# Altium footprint library PcbLib.PcbLib: 162 footprints (part 6 of 11)
Each footprint in its own frame and in the unit in brackets; x right, y up, seen from the top. Pads: shape width x height; smd on the part's side, far side on the other; paste and mask are expansions set on the pad; w line width, h text height; cw(c..) or ccw(c..) is an arc to the next point about the centre after c.
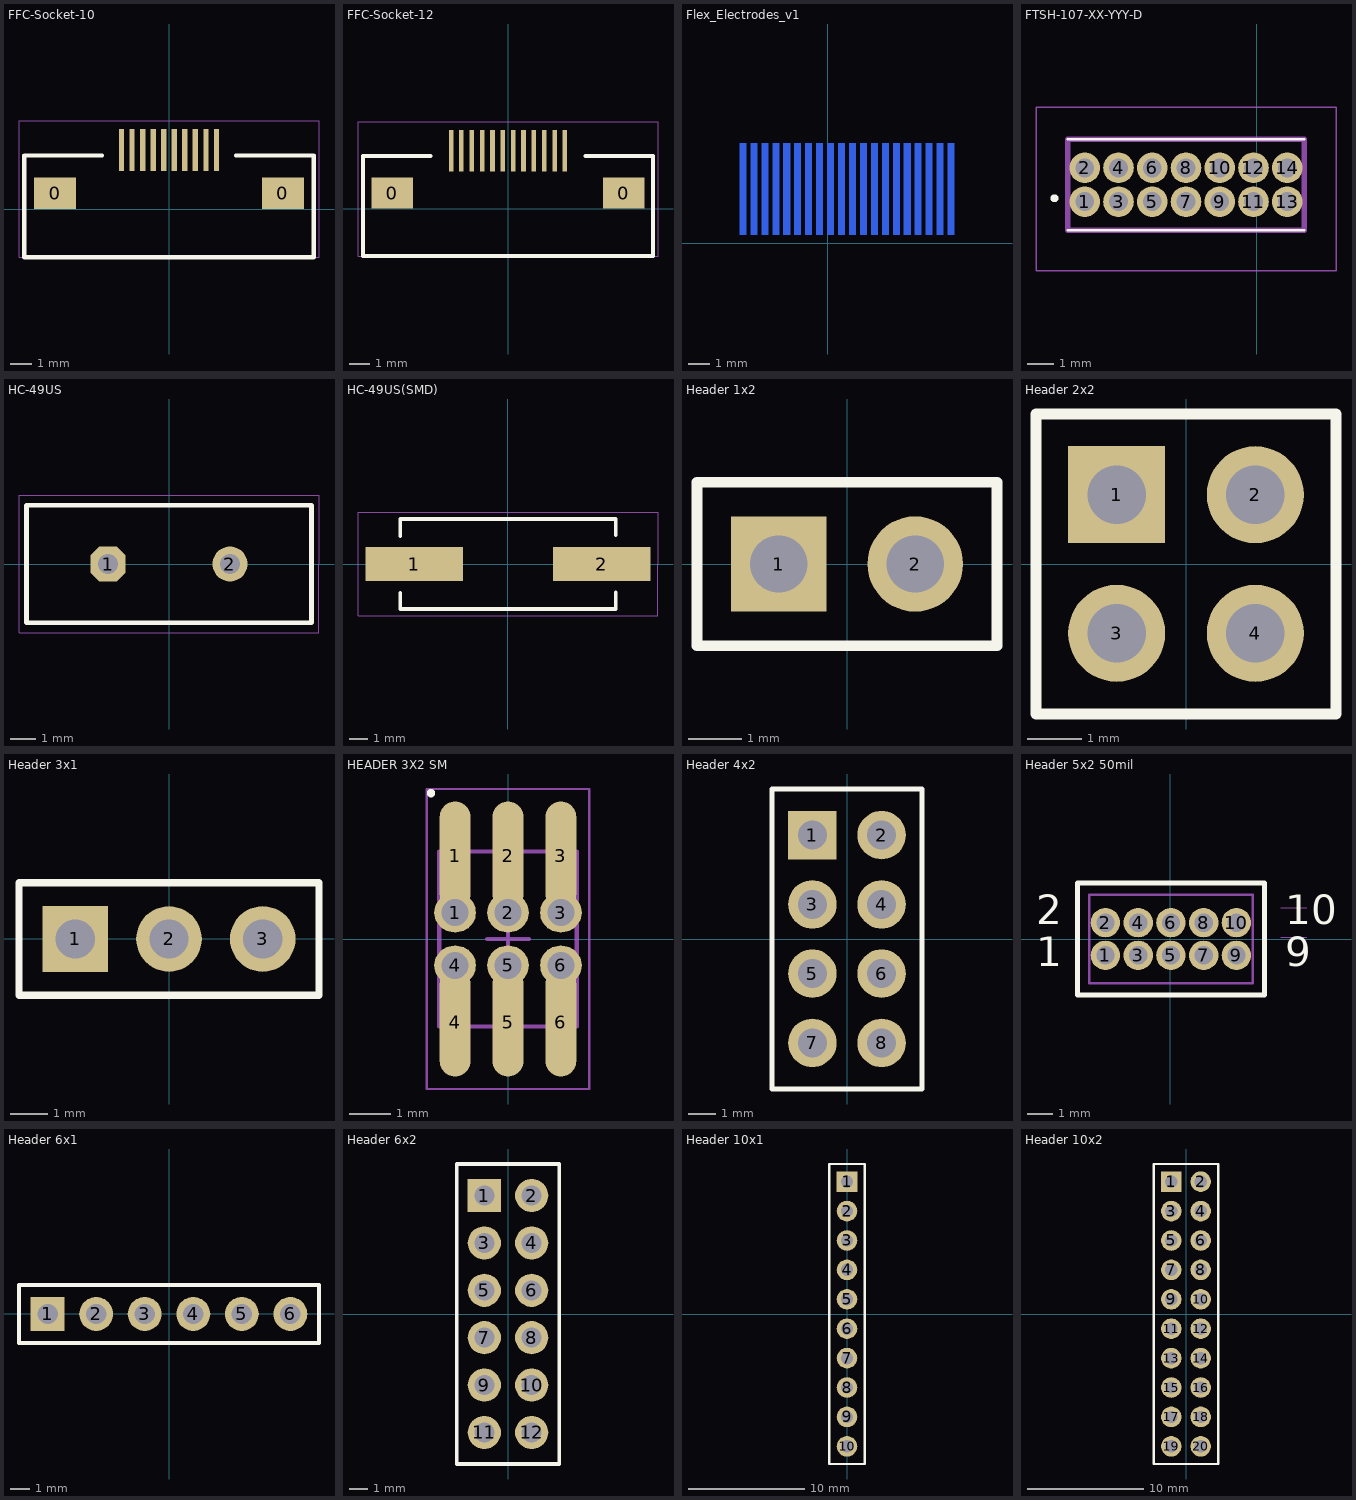
[diagram p5: the footprints below, top view; thin cyan lines are the x and y axes]

## FFC-Socket-10 [mm] "SMD FFC Cable ZIF Socket 10 Pin"
height 2
pads (12):
  rect 2x1.5 smd: 0(-5.4,0.75) 0(5.4,0.75)
  rect 0.25x2 smd: 1(-2.25,2.8) 2(-1.75,2.8) 3(-1.25,2.8) 4(-0.75,2.8) 5(-0.25,2.8) 6(0.25,2.8) 7(0.75,2.8) 8(1.25,2.8) 9(1.75,2.8) 10(2.25,2.8)
Top Overlay:
  lines w0.2: -3.175,2.54 -6.858,2.54 -6.858,-2.286 6.858,-2.286 6.858,2.54 3.175,2.54
Mechanical 15:
  lines w0.05: -7.112,-2.286 7.112,-2.286 7.112,4.191 -7.112,4.191 -7.112,-2.286
3D body "71117.stp": height 2, standoff 0.13, extent -5.25,-2.36 5.25,2.54

## FFC-Socket-12 [mm] "SMD FFC Cable ZIF Socket 12 Pin"
height 2
pads (14):
  rect 2x1.5 smd: 0(-5.6,0.75) 0(5.6,0.75)
  rect 0.22x2 smd: 1(-2.75,2.8) 2(-2.25,2.8) 3(-1.75,2.8) 5(-0.75,2.8) 6(-0.25,2.8) 7(0.25,2.8) 8(0.75,2.8) 9(1.25,2.8) 10(1.75,2.8) 11(2.25,2.8) 12(2.75,2.8)
  rect 0.23x2 smd: 4(-1.25,2.8)
Top Overlay:
  lines w0.2: -3.75,2.54 -7,2.54 -7,-2.286 7,-2.286 7,2.54 3.75,2.54
Mechanical 15:
  lines w0.05: -7.25,-2.286 -7.25,4.191 7.25,4.191 7.25,-2.286 -7.25,-2.286
3D body "ssfv12r_2stlf.stp": height 1.87, standoff 0, extent -5.75,-2.35 5.75,2.55

## Flex_Electrodes_v1 [mm]
pads (20):
  rect 0.3x4.216 smd far side: 1(-3.886,2.494) 2(-3.383,2.494) 3(-2.879,2.494) 4(-2.376,2.494) 5(-1.873,2.494) 6(-1.37,2.494) 7(-0.867,2.494) 8(-0.363,2.494) 9(0.14,2.494) 10(0.643,2.494) 11(1.146,2.494) 12(1.649,2.494) 13(2.153,2.494) 14(2.656,2.494) 15(3.159,2.494) 16(3.662,2.494) 17(4.165,2.494) 18(4.669,2.494) 19(5.172,2.494) 20(5.675,2.494)

## FTSH-107-XX-YYY-D [mm]
pads (14):
  round 1.15 hole 0.71: 1(-6.477,-10.922) 2(-6.477,-9.652) 3(-5.207,-10.922) 4(-5.207,-9.652) 5(-3.937,-10.922) 6(-3.937,-9.652) 7(-2.667,-10.922) 8(-2.667,-9.652) 9(-1.397,-10.922) 10(-1.397,-9.652) 11(-0.127,-10.922) 12(-0.127,-9.652) 13(1.143,-10.922) 14(1.143,-9.652)
Top Overlay:
  circle w0.2: c-7.62,-10.795 r0.05
  lines w0.1: -7.112,-12.002 1.778,-12.002 ; -7.112,-8.572 1.778,-8.572
Mechanical 13:
  lines w0.2: -7.112,-12.002 -7.112,-8.572 1.778,-8.572 1.778,-12.002 -7.112,-12.002
Mechanical 15:
  lines w0.05: -8.312,-13.522 -8.312,-7.372 2.978,-7.372 2.978,-13.522 -8.312,-13.522
3D body "FTSH-107-04-L-D.stp": height 6.34, standoff -2.27, extent -7.112,-11.938 1.778,-8.509

## HC-49US [mm] "Quartz Crystal"
height 4
pads (2):
  oct 1.4x1.4 / inner oct 2x2 / far side oct 2x2 hole 0.8: 1(-2.44,0)
  round 1.4 / inner round 2 / far side round 2 hole 0.8: 2(2.44,0)
Top Overlay:
  lines w0.2: -5.7,-2.35 -5.7,2.35 5.7,2.35 5.7,-2.35 -5.7,-2.35
Mechanical 15:
  lines w0.05: -5.999,-2.749 5.999,-2.749 6,2.75 -6,2.749 -5.999,-2.75
3D body "SW3dPS-hc49us-1.STEP": height 3.5, standoff -3, extent -5.7,-2.325 5.8,2.325

## HC-49US(SMD) [mm] "SMD LOW PROFILE CRYSTAL"
height 4.2
pads (2):
  rect 5.2x1.8 smd: 1(-5,0) 2(5,0)
Top Overlay:
  lines w0.2: -5.75,-1.55 -5.75,-2.4 5.75,-2.4 5.75,-1.5 ; -5.75,1.5 -5.75,2.4 5.75,2.4 5.75,1.55
Mechanical 15:
  lines w0.05: -8,-2.749 8,-2.749 8,2.75 -8,2.749 -8,-2.749
3D body "User Library-HC49US.STEP": height 4.2, standoff 0, extent -6.4,-2.35 6.3,2.35

## Header 1x2 [mil] "2-Pin, 1 Row, 2 Column Header"
height 488.19
pads (2):
  rect 70x70 hole 42: 1(-50,0)
  round 70 hole 42: 2(50,0)
Top Overlay:
  lines w7.87: -110,-60 -110,60 110,60 110,-60 -110,-60

## Header 2x2 [mil] "4-Pin, 2 Row, 2 Column Header"
height 488.19
pads (4):
  rect 70x70 hole 42: 1(-50,50)
  round 70 hole 42: 2(50,50) 3(-50,-50) 4(50,-50)
Top Overlay:
  lines w7.87: -108.27,-108.27 108.27,-108.27 108.27,108.27 -108.27,108.27 -108.27,-108.27

## Header 3x1 [mil] "3-Pin, 1 Row, Header"
height 472.44
pads (3):
  rect 70x70 hole 42: 1(-100,0)
  round 70 hole 42: 2(0,0) 3(100,0)
Top Overlay:
  lines w7.87: -160,-60.08 -160,60 160,60 160,-60.08 -160,-60.08
3D body "pin_header_aw_108_03-t.stp": height 370.08, standoff -118.11, extent -155,-50 145,48.28

## HEADER 3X2 SM [mm] "Surface Mount 3x2 Pin Header"
height 5
pads (12):
  oval 1x0.95 hole 0.65: 1(-1.27,0.635) 2(0,0.635) 3(1.27,0.635) 4(-1.27,-0.635) 5(0,-0.635) 6(1.27,-0.635)
  oval 0.74x2.6 smd: 1(-1.27,2) 2(0,2) 3(1.27,2) 4(-1.27,-2) 5(0,-2) 6(1.27,-2)
Top Overlay:
  circle w0.1: c-1.85,3.5 r0.05
Mechanical 13:
  lines w0.1: -1.65,-2.1 -1.65,2.1 1.65,2.1 1.65,-2.1 -1.65,-2.1
Mechanical 15:
  lines w0.05: -1.95,-3.6 -1.95,3.6 1.95,3.6 1.95,-3.6 -1.95,-3.6
  lines w0.1: -0.5,0 0.5,0 ; 0,-0.5 0,0.5

## Header 4x2 [mil] "8-Pin, 4 Row, 2 Column Header"
height 488.19
pads (8):
  rect 70x70 hole 42: 1(-50,150)
  round 70 hole 42: 2(50,150) 3(-50,50) 4(50,50) 5(-50,-50) 6(50,-50) 7(-50,-150) 8(50,-150)
Top Overlay:
  lines w7.87: -108.27,-8.27 -108.27,216.54 108.27,216.54 108.27,-216.54 -108.27,-216.54 -108.27,108.27
3D body "12538.stp": height 340.35, standoff -124.22, extent -98.42,-199.99 98.43,200.01

## Header 5x2 50mil [mil]
pads (10):
  round 45 hole 27.95: 1(-99.29,-24.33) 2(-99.29,25.67) 3(-49.29,-24.33) 4(-49.29,25.67) 5(0.71,-24.33) 6(0.71,25.67) 7(50.71,-24.33) 8(50.71,25.67) 9(100.71,-24.33) 10(100.71,25.67)
Top Overlay:
  lines w7.87: -142.01,-84.57 -142.01,85.91 143.43,85.91 143.43,-84.57 -142.01,-84.57
  text "1" at -205.31,-56.34 h77.5
  text "2" at -205.31,7.68 h77.5
  text "9" at 175.24,-56.34 h77.5
  text "10" at 175.24,7.68 h77.5
Top Solder:
  circle w0: c-99.29,-24.33 r24.51
  circle w0: c-99.29,25.67 r24.51
  circle w0: c-49.29,-24.33 r24.51
  circle w0: c-49.29,25.67 r24.51
  circle w0: c0.71,-24.33 r24.51
  circle w0: c0.71,25.67 r24.51
  circle w0: c50.71,-24.33 r24.51
  circle w0: c50.71,25.67 r24.51
  circle w0: c100.71,-24.33 r24.51
  circle w0: c100.71,25.67 r24.51
Bottom Solder:
  circle w0: c-99.29,-24.33 r24.51
  circle w0: c-99.29,25.67 r24.51
  circle w0: c-49.29,-24.33 r24.51
  circle w0: c-49.29,25.67 r24.51
  circle w0: c0.71,-24.33 r24.51
  circle w0: c0.71,25.67 r24.51
  circle w0: c50.71,-24.33 r24.51
  circle w0: c50.71,25.67 r24.51
  circle w0: c100.71,-24.33 r24.51
  circle w0: c100.71,25.67 r24.51
Mechanical 16:
  lines w3.94: -124.29,-66.81 -74.29,-66.81 ; -124.29,-66.81 -74.29,-66.81 ; -124.29,-66.81 -124.29,68.15 ; -124.29,68.15 -74.29,68.15 ; -124.29,68.15 -74.29,68.15 ; -107.28,-32.32 -107.28,-16.34 ; -107.28,-32.32 -91.3,-32.32 ; -107.28,-32.32 -91.3,-32.32 ; -107.28,-32.32 -107.28,-16.34 ; -107.28,-16.34 -91.3,-16.34 ; -107.28,-16.34 -91.3,-16.34 ; -107.28,17.68 -107.28,33.66 ; -107.28,17.68 -91.3,17.68 ; -107.28,17.68 -91.3,17.68 ; -107.28,17.68 -107.28,33.66 ; -107.28,33.66 -91.3,33.66 ; -107.28,33.66 -91.3,33.66 ; -91.3,-32.32 -91.3,-16.34 ; -91.3,-32.32 -91.3,-16.34 ; -91.3,17.68 -91.3,33.66 ; -91.3,17.68 -91.3,33.66 ; -74.29,-66.81 -24.29,-66.81 ; -74.29,-66.81 -24.29,-66.81 ; -74.29,68.15 -24.29,68.15 ; -74.29,68.15 -24.29,68.15 ; -57.28,-32.32 -57.28,-16.34 ; -57.28,-32.32 -41.3,-32.32 ; -57.28,-32.32 -41.3,-32.32 ; -57.28,-32.32 -57.28,-16.34 ; -57.28,-16.34 -41.3,-16.34 ; -57.28,-16.34 -41.3,-16.34 ; -57.28,17.68 -57.28,33.66 ; -57.28,17.68 -41.3,17.68 ; -57.28,17.68 -41.3,17.68 ; -57.28,17.68 -57.28,33.66 ; -57.28,33.66 -41.3,33.66 ; -57.28,33.66 -41.3,33.66 ; -41.3,-32.32 -41.3,-16.34 ; -41.3,-32.32 -41.3,-16.34 ; -41.3,17.68 -41.3,33.66 ; -41.3,17.68 -41.3,33.66 ; -24.29,-66.81 25.71,-66.81 ; -24.29,-66.81 25.71,-66.81 ; -24.29,68.15 25.71,68.15 ; -24.29,68.15 25.71,68.15 ; -7.28,-32.32 -7.28,-16.34 ; -7.28,-32.32 8.7,-32.32 ; -7.28,-32.32 8.7,-32.32 ; -7.28,-32.32 -7.28,-16.34 ; -7.28,-16.34 8.7,-16.34 ; -7.28,-16.34 8.7,-16.34 ; -7.28,17.68 -7.28,33.66 ; -7.28,17.68 8.7,17.68 ; -7.28,17.68 8.7,17.68 ; -7.28,17.68 -7.28,33.66 ; -7.28,33.66 8.7,33.66 ; -7.28,33.66 8.7,33.66 ; 8.7,-32.32 8.7,-16.34 ; 8.7,-32.32 8.7,-16.34 ; 8.7,17.68 8.7,33.66 ; 8.7,17.68 8.7,33.66 ; 25.71,-66.81 75.71,-66.81 ; 25.71,-66.81 75.71,-66.81 ; 25.71,68.15 75.71,68.15 ; 25.71,68.15 75.71,68.15 ; 42.72,-32.32 42.72,-16.34 ; 42.72,-32.32 58.7,-32.32 ; 42.72,-32.32 58.7,-32.32 ; 42.72,-32.32 42.72,-16.34 ; 42.72,-16.34 58.7,-16.34 ; 42.72,-16.34 58.7,-16.34 ; 42.72,17.68 42.72,33.66 ; 42.72,17.68 58.7,17.68 ; 42.72,17.68 58.7,17.68 ; 42.72,17.68 42.72,33.66 ; 42.72,33.66 58.7,33.66 ; 42.72,33.66 58.7,33.66 ; 58.7,-32.32 58.7,-16.34 ; 58.7,-32.32 58.7,-16.34 ; 58.7,17.68 58.7,33.66 ; 58.7,17.68 58.7,33.66 ; 75.71,-66.81 125.71,-66.81 125.71,68.15 75.71,68.15 ; 92.72,-32.32 108.7,-32.32 108.7,-16.34 92.72,-16.34 92.72,-32.32 ; 92.72,17.68 108.7,17.68 108.7,33.66 92.72,33.66 92.72,17.68
  text "1" at -205.31,-56.34 h77.5
  text "2" at -205.31,7.68 h77.5
  text "9" at 175.24,-56.34 h77.5
  text "10" at 175.24,7.68 h77.5
Mechanical 40:
  lines w0: 168.31,3.19 208.31,3.19 ; 168.31,48.15 208.31,48.15
3D body "FTSH-105-01-F-D--3DModel-STEP-56544.STEP": height 219.5, standoff -89.5, extent -124.29,-67.5 125.71,67.5

## Header 6x1 [mil] "6-Pin, 1 Row, Header"
height 472.44
pads (6):
  rect 70x70 hole 42: 1(-250,0)
  round 70 hole 42: 2(-150,0) 3(-50,0) 4(50,0) 5(150,0) 6(250,0)
Top Overlay:
  lines w7.87: -309.06,-60.08 309.06,-60.08 309.06,60 -309.06,60 -309.06,-60.08
3D body "User Library-1x6 TH Pitch 2_54mm.STEP": height 373.85, standoff -125.98, extent -300,-50 300,50

## Header 6x2 [mil] "12-Pin, 6 Row, 2 Column Header"
height 488.19
pads (12):
  rect 70x70 hole 42: 1(-50,250)
  round 70 hole 42: 2(50,250) 3(-50,150) 4(50,150) 5(-50,50) 6(50,50) 7(-50,-50) 8(50,-50) 9(-50,-150) 10(50,-150) 11(-50,-250) 12(50,-250)
Top Overlay:
  lines w7.87: -108.27,-316.54 108.27,-316.54 ; -108.27,-314.96 -108.27,208.27 ; -108.27,-8.27 -108.27,216.54 ; -108.27,91.73 -108.27,316.54 108.27,316.54 108.27,-314.96
3D body "12540.stp": height 338.35, standoff -126.22, extent -99.42,-297.99 97.43,302.01

## Header 10x1 [mil] "10-Pin, 10 Row, 1 Column Header"
height 488.19
pads (10):
  rect 70x70 hole 42: 1(0,450)
  round 70 hole 42: 2(0,350) 3(0,250) 4(0,150) 5(0,50) 6(0,-50) 7(0,-150) 8(0,-250) 9(0,-350) 10(0,-450)
Top Overlay:
  lines w7.87: -60,-510 -60,510 60,510 60,-510 -60,-510
3D body "User Library-1x10 TH Pitch 2_54mm.STEP": height 362.2, standoff -137.8, extent -50,-500 50,500

## Header 10x2 [mil] "20-Pin, 10 Row, 2 Column Header"
height 488.19
pads (20):
  rect 70x70 hole 42: 1(-50,450)
  round 70 hole 42: 2(50,450) 3(-50,350) 4(50,350) 5(-50,250) 6(50,250) 7(-50,150) 8(50,150) 9(-50,50) 10(50,50) 11(-50,-50) 12(50,-50) 13(-50,-150) 14(50,-150) 15(-50,-250) 16(50,-250) 17(-50,-350) 18(50,-350) 19(-50,-450) 20(50,-450)
Top Overlay:
  lines w7.87: -110,-510 110,-510 110,510 -110,510 -110,-510
3D body "70284437.stp": height 344.35, standoff -120.22, extent -98.43,-499.99 98.42,500.01